# Altium footprint library MCP2515.PcbLib: 1 footprints
Each footprint in its own frame and in the unit in brackets; x right, y up, seen from the top. Pads: shape width x height; smd on the part's side, far side on the other; paste and mask are expansions set on the pad; w line width, h text height; cw(c..) or ccw(c..) is an arc to the next point about the centre after c.
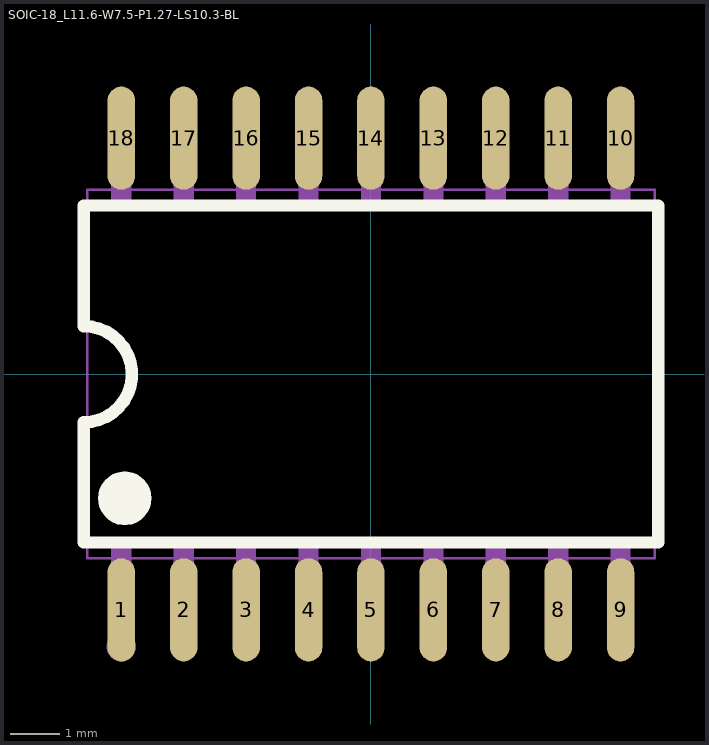
[diagram p0: the footprint, top view; thin cyan lines are the x and y axes]

## SOIC-18_L11.6-W7.5-P1.27-LS10.3-BL [mm]
pads (18):
  oval 0.56x2.1 smd: 1(-5.08,-4.8) 2(-3.81,-4.8) 3(-2.54,-4.8) 4(-1.27,-4.8) 5(0,-4.8) 6(1.27,-4.8) 7(2.54,-4.8) 8(3.81,-4.8) 9(5.08,-4.8) 10(5.08,4.8) 11(3.81,4.8) 12(2.54,4.8) 13(1.27,4.8) 14(0,4.8) 15(-1.27,4.8) 16(-2.54,4.8) 17(-3.81,4.8) 18(-5.08,4.8)
Top Overlay:
  region: -5.55,-2.53 -5.541,-2.43 -5.515,-2.334 -5.47,-2.244 -5.41,-2.164 -5.337,-2.096 -5.252,-2.043 -5.158,-2.007 -5.06,-1.989 -4.96,-1.989 -4.862,-2.007 -4.768,-2.043 -4.683,-2.096 -4.61,-2.164 -4.55,-2.244 -4.505,-2.334 -4.479,-2.43 -4.47,-2.53 -4.479,-2.63 -4.505,-2.726 -4.55,-2.816 -4.61,-2.896 -4.683,-2.964 -4.768,-3.017 -4.862,-3.053 -4.96,-3.071 -5.06,-3.071 -5.158,-3.053 -5.252,-3.017 -5.337,-2.964 -5.41,-2.896 -5.47,-2.816 -5.515,-2.726 -5.541,-2.63
  lines w0.254: -5.842,-1.011 -5.842,-3.429 5.842,-3.429 5.842,3.429 -5.842,3.429 -5.842,0.973 cw(c-5.842,-0.005) -5.842,-0.983
Mechanical 2:
  circle w0.3: c-5.08,-5.55 r0.15
Mechanical 6:
  lines w0.051: -5.775,-3.75 5.776,-3.75 5.775,3.75 -5.775,3.75 -5.775,-3.75
Mechanical 7:
  region: 4.88,4.46 4.88,3.49 5.28,3.49 5.28,4.46
  region: 3.61,4.46 3.61,3.49 4.01,3.49 4.01,4.46
  region: 2.34,4.46 2.34,3.49 2.74,3.49 2.74,4.46
  region: 1.07,4.46 1.07,3.49 1.47,3.49 1.47,4.46
  region: -0.2,4.46 -0.2,3.49 0.2,3.49 0.2,4.46
  region: -1.47,4.46 -1.47,3.49 -1.07,3.49 -1.07,4.46
  region: -2.74,4.46 -2.74,3.49 -2.34,3.49 -2.34,4.46
  region: -4.01,4.46 -4.01,3.49 -3.61,3.49 -3.61,4.46
  region: -5.28,4.46 -5.28,3.49 -4.88,3.49 -4.88,4.46
  region: 4.88,-4.46 4.88,-3.49 5.28,-3.49 5.28,-4.46
  region: 3.61,-4.46 3.61,-3.49 4.01,-3.49 4.01,-4.46
  region: 2.34,-4.46 2.34,-3.49 2.74,-3.49 2.74,-4.46
  region: 1.07,-4.46 1.07,-3.49 1.47,-3.49 1.47,-4.46
  region: -0.2,-4.46 -0.2,-3.49 0.2,-3.49 0.2,-4.46
  region: -1.47,-4.46 -1.47,-3.49 -1.07,-3.49 -1.07,-4.46
  region: -2.74,-4.46 -2.74,-3.49 -2.34,-3.49 -2.34,-4.46
  region: -4.01,-4.46 -4.01,-3.49 -3.61,-3.49 -3.61,-4.46
  region: -5.28,-4.46 -5.28,-3.49 -4.88,-3.49 -4.88,-4.46
Mechanical 8:
  region: -5.01,-2.55 -5.01,-2.575 -5.045,-2.61 -5.095,-2.61 -5.13,-2.575 -5.13,-2.55 -5.13,-2.525 -5.095,-2.49 -5.045,-2.49 -5.01,-2.525 -5.01,-2.55
Mechanical 9:
  region: 4.88,5.15 4.88,4.45 5.28,4.45 5.28,5.15
  region: 3.61,5.15 3.61,4.45 4.01,4.45 4.01,5.15
  region: 2.34,5.15 2.34,4.45 2.74,4.45 2.74,5.15
  region: 1.07,5.15 1.07,4.45 1.47,4.45 1.47,5.15
  region: -0.2,5.15 -0.2,4.45 0.2,4.45 0.2,5.15
  region: -1.47,5.15 -1.47,4.45 -1.07,4.45 -1.07,5.15
  region: -2.74,5.15 -2.74,4.45 -2.34,4.45 -2.34,5.15
  region: -4.01,5.15 -4.01,4.45 -3.61,4.45 -3.61,5.15
  region: -5.28,5.15 -5.28,4.45 -4.88,4.45 -4.88,5.15
  region: 4.88,-5.15 4.88,-4.45 5.28,-4.45 5.28,-5.15
  region: 3.61,-5.15 3.61,-4.45 4.01,-4.45 4.01,-5.15
  region: 2.34,-5.15 2.34,-4.45 2.74,-4.45 2.74,-5.15
  region: 1.07,-5.15 1.07,-4.45 1.47,-4.45 1.47,-5.15
  region: -0.2,-5.15 -0.2,-4.45 0.2,-4.45 0.2,-5.15
  region: -1.47,-5.15 -1.47,-4.45 -1.07,-4.45 -1.07,-5.15
  region: -2.74,-5.15 -2.74,-4.45 -2.34,-4.45 -2.34,-5.15
  region: -4.01,-5.15 -4.01,-4.45 -3.61,-4.45 -3.61,-5.15
  region: -5.28,-5.15 -5.28,-4.45 -4.88,-4.45 -4.88,-5.15